# Altium schematic symbol library 1725708.SchLib: 1 symbol
Pins are listed as number, name and electrical type; pins without a type are passive.

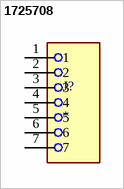
[diagram p0: symbol 1725708]

## 1725708
designator J?
PCB Terminal Screw 2.54mm 20AWG 160V 6A 7 Position COMBICON MPT Series | Phoenix Contact 1725708; SnapEDA_Link: https://www.snapeda.com/parts/1725708/Phoenix+Contact/view-part/?ref=snap; Package: None; Value: *; MF: Phoenix Contact; MP: 1725708; Check_prices: https://www.snapeda.com/parts/1725708/Phoenix+Contact/view-part/?ref=eda
footprint PHOENIX_1725708
pins: 1, 2, 3, 4, 5, 6, 7